# Altium footprint library SBC_PcbLib.PcbLib: 52 footprints (part 3 of 4)
Each footprint in its own frame and in the unit in brackets; x right, y up, seen from the top. Pads: shape width x height; smd on the part's side, far side on the other; paste and mask are expansions set on the pad; w line width, h text height; cw(c..) or ccw(c..) is an arc to the next point about the centre after c.
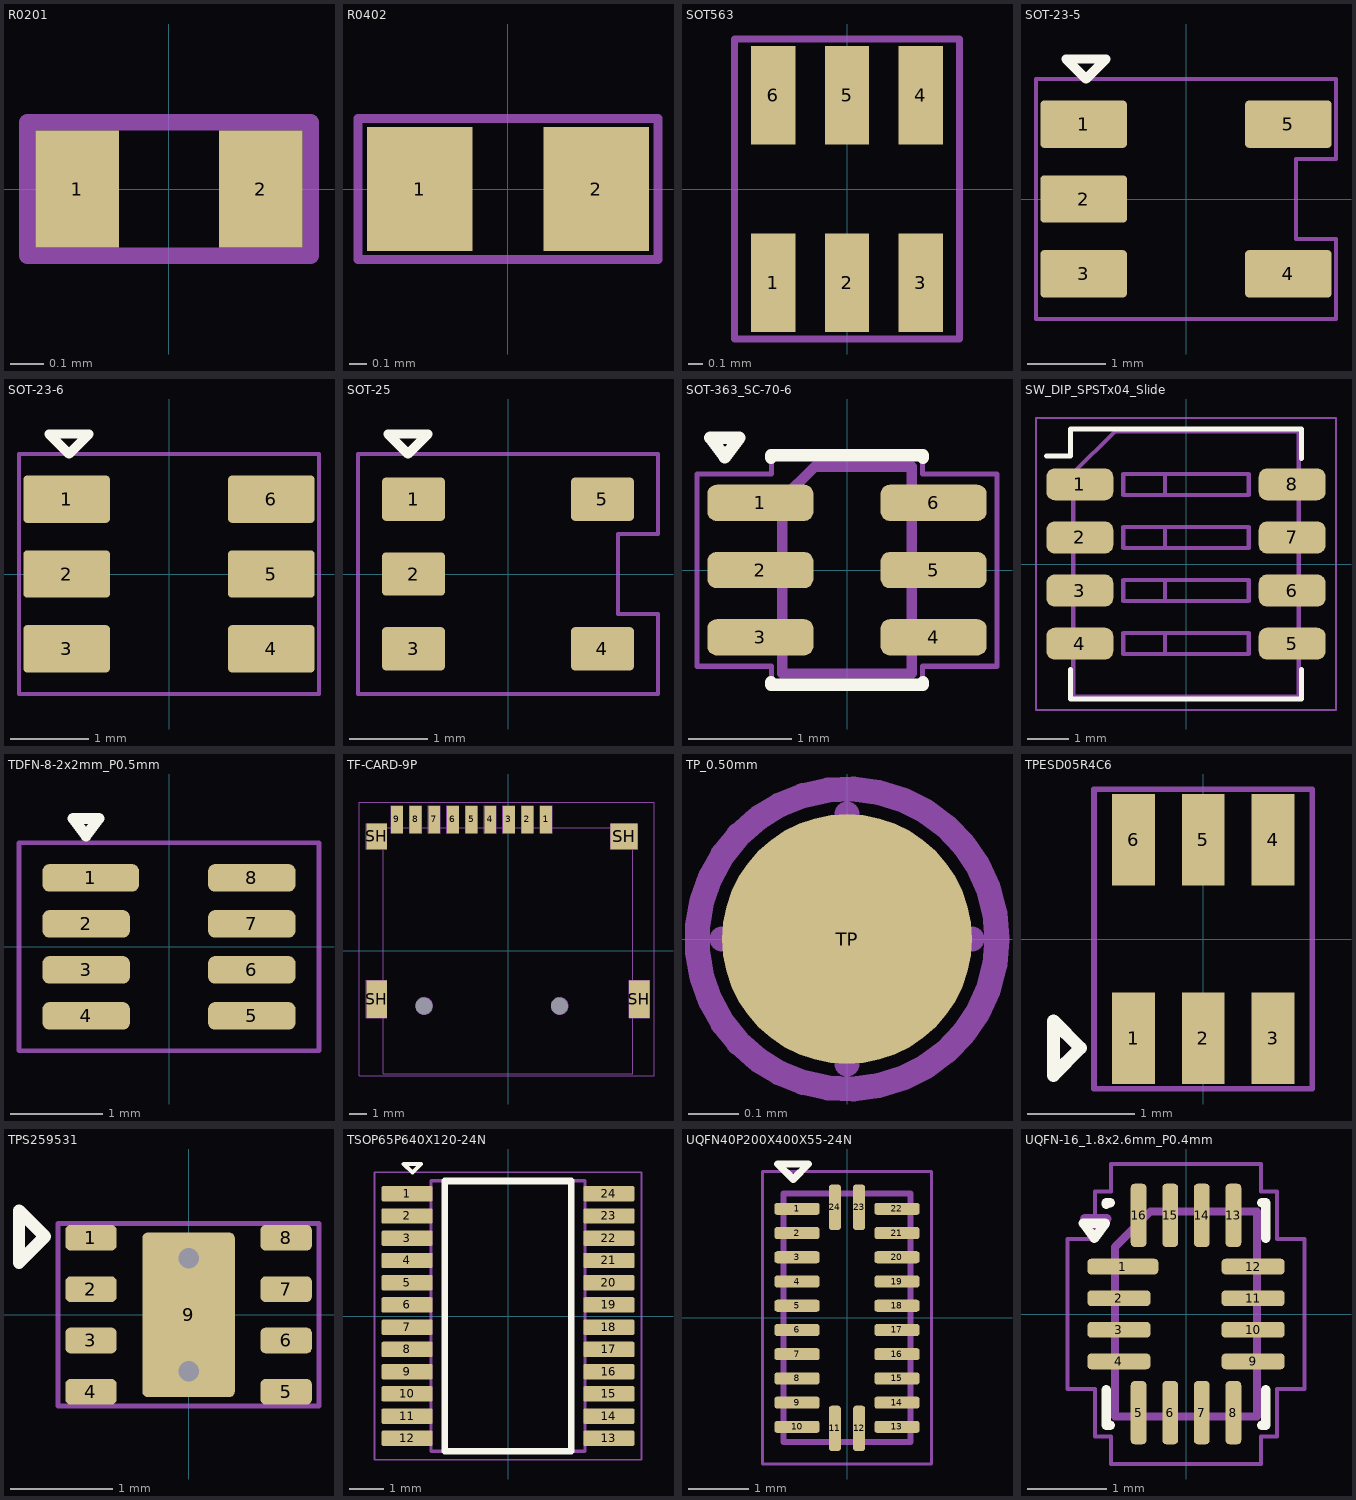
[diagram p2: the footprints below, top view; thin cyan lines are the x and y axes]

## R0201 [mm]
pads (2):
  rect 0.25x0.35 smd: 1(-0.275,0) 2(0.275,0)
Top Courtyard:
  lines w0.05: -0.425,-0.2 -0.425,0 -0.425,0.2 0.425,0.2 0.425,-0.2 -0.425,-0.2
Top Assembly:
  text ".Designator" at -1.016,-0.635 h0.5
3D body "R_0201_0603Metric.step": height 0.23, standoff 0, extent -0.3,-0.15 0.3,0.15

## R0402 [mm]
pads (2):
  rect 0.6x0.7 smd: 1(-0.5,0) 2(0.5,0)
Top Courtyard:
  lines w0.05: -0.85,-0.4 0.85,-0.4 0.85,0.4 -0.85,0.4 -0.85,0 -0.85,-0.4
Top Assembly:
  text ".Designator" at -1.016,-0.127 h0.5
3D body "R_0402_1005Metric.step": height 0.35, standoff 0, extent -0.5,-0.25 0.5,0.25

## SOT563 [mm]
pads (6):
  rect 0.3x0.67 smd: 1(-0.5,-0.635) 2(0,-0.635) 3(0.5,-0.635) 4(0.5,0.635) 5(0,0.635) 6(-0.5,0.635)
Top Courtyard:
  lines w0.05: -0.762,-1.016 -0.762,1.016 0.762,1.016 0.762,-1.016 -0.762,-1.016
3D body "AP61300Z6-7.stp": height 0.6, standoff 0, extent -0.8,-0.813 0.8,0.813

## SOT-23-5 [mm] "TI SOT-23-5"
pads (5):
  rrect16% 1.1x0.6 smd: 1(-1.3,0.95) 2(-1.3,0) 3(-1.3,-0.95) 4(1.3,-0.95) 5(1.3,0.95)
Top Overlay:
  lines w0.12: -1.524,1.778 -1.27,1.524 -1.016,1.778 -1.524,1.778
Top Courtyard:
  lines w0.05: -1.905,-1.524 -1.905,1.524 1.905,1.524 1.905,0.508 1.397,0.508 1.397,-0.508 1.905,-0.508 1.905,-1.524 -1.905,-1.524
Top Assembly:
  text ".Designator" at -2.413,-2.032 h0.5
3D body "TLV74311PDBVR.stp": height 1.2, standoff 0, extent -1.4,-1.45 1.4,1.45

## SOT-23-6 [mm] "TI SOT-23-6"
pads (6):
  rrect16% 1.1x0.6 smd: 1(-1.3,0.95) 2(-1.3,0) 3(-1.3,-0.95) 4(1.3,-0.95) 5(1.3,0) 6(1.3,0.95)
Top Overlay:
  lines w0.12: -1.524,1.778 -1.016,1.778 -1.27,1.524 -1.524,1.778
Top Courtyard:
  lines w0.05: -1.905,-1.524 1.905,-1.524 1.905,1.524 -1.905,1.524 -1.905,-1.524
Top Assembly:
  text ".Designator" at -2.286,-2.032 h0.5
3D body "TPS22918DBVR.step": height 1.45, standoff 0, extent -1.4,-1.45 1.4,1.45

## SOT-25 [mm] "SOT-25"
pads (5):
  rrect18% 0.8x0.55 smd: 1(-1.2,0.95) 2(-1.2,0) 3(-1.2,-0.95) 4(1.2,-0.95) 5(1.2,0.95)
Top Overlay:
  lines w0.12: -1.524,1.778 -1.016,1.778 -1.27,1.524 -1.524,1.778
Top Courtyard:
  lines w0.05: -1.905,-1.524 1.905,-1.524 1.905,-0.508 1.397,-0.508 1.397,0.508 1.905,0.508 1.905,1.524 -1.905,1.524 -1.905,-1.524
Top Assembly:
  text ".Designator" at -2.413,-2.032 h0.5
3D body "TLV74311PDBVR.stp": height 1.2, standoff 0, extent -1.4,-1.45 1.4,1.45

## SOT-363_SC-70-6 [mm] "SOT, 6 Pin (https://home.jeita.or.jp/tsc/std-pdf/ED-7500A.pdf#page=170, JEDEC MO-203, variant AB, https://www.jedec.org/document_search?search_api_views_fulltext=MO-203)"
pads (6):
  rrect50% 1.025x0.35 smd: 1(-0.837,0.65) 2(-0.837,0) 3(-0.837,-0.65) 4(0.837,-0.65) 5(0.837,0) 6(0.837,0.65)
Top Overlay:
  lines w0.12: -0.735,-1.085 -0.735,-1.11 0.735,-1.11 0.735,-1.085 ; -0.735,1.085 -0.735,1.11 0.735,1.11 0.735,1.085 ; -1.32,1.28 -1.18,1.09 -1.04,1.28 -1.32,1.28
Top Courtyard:
  lines w0.05: -1.45,-0.93 -1.45,0.93 -0.73,0.93 -0.73,1.1 0.73,1.1 0.73,0.93 1.45,0.93 1.45,-0.93 0.73,-0.93 0.73,-1.1 -0.73,-1.1 -0.73,-0.93 -1.45,-0.93
Top Assembly:
  lines w0.1: -0.625,-1 0.625,-1 0.625,1 -0.312,1 -0.625,0.687 -0.625,-1
  text ".Designator" at -2.032,-1.778 h0.5
3D body "TPESD05R4C6_SOT-363.step": height 0.95, standoff 0, extent -1.05,-1 1.05,1

## SW_DIP_SPSTx04_Slide [mm] "SMD 4x-dip-switch SPST P1.27mm"
pads (8):
  rrect50% 1.6x0.76 smd: 1(-2.54,1.905) 2(-2.54,0.635) 3(-2.54,-0.635) 4(-2.54,-1.905) 5(2.54,-1.905) 6(2.54,-0.635) 7(2.54,0.635) 8(2.54,1.905)
Top Overlay:
  lines w0.12: -3.34,2.585 -2.76,2.585 -2.76,3.235 2.76,3.235 2.76,2.525 ; -2.76,-2.525 -2.76,-3.235 2.76,-3.235 2.76,-2.525
Top Courtyard:
  lines w0.05: -3.59,-3.49 3.59,-3.49 3.59,3.49 -3.59,3.49 -3.59,-3.49
Top Assembly:
  lines w0.1: -1.5,-2.155 -1.5,-1.655 ; -1.5,-2.155 -1.5,-1.655 ; -1.5,-2.155 1.5,-2.155 1.5,-1.655 -1.5,-1.655 ; -1.5,-2.155 -0.5,-2.155 ; -1.5,-1.655 -0.5,-1.655 ; -1.5,-0.885 -1.5,-0.385 ; -1.5,-0.885 -0.5,-0.885 ; -1.5,-0.885 1.5,-0.885 1.5,-0.385 -1.5,-0.385 ; -1.5,-0.885 -1.5,-0.385 ; -1.5,-0.385 -0.5,-0.385 ; -1.5,0.385 1.5,0.385 1.5,0.885 -1.5,0.885 ; -1.5,0.385 -0.5,0.385 ; -1.5,0.385 -1.5,0.885 ; -1.5,0.385 -1.5,0.885 ; -1.5,0.885 -0.5,0.885 ; -1.5,1.655 1.5,1.655 1.5,2.155 -1.5,2.155 ; -1.5,1.655 -0.5,1.655 ; -1.5,1.655 -1.5,2.155 ; -1.5,1.655 -1.5,2.155 ; -1.5,2.155 -0.5,2.155 ; -0.5,-2.155 -0.5,-1.655 ; -0.5,-2.155 -0.5,-1.655 ; -0.5,-0.885 -0.5,-0.385 ; -0.5,-0.885 -0.5,-0.385 ; -0.5,0.385 -0.5,0.885 ; -0.5,0.385 -0.5,0.885 ; -0.5,1.655 -0.5,2.155 ; -0.5,1.655 -0.5,2.155 ; -2.7,-3.175 -2.7,2.175 -1.7,3.175 2.7,3.175 2.7,-3.175 -2.7,-3.175
  text "on" at 0.19,2.265 h0.8
  text ".Designator" at -3.683,-4.064 h0.8
3D body "SW_DIP_SPSTx04_Slide_Copal_CHS-04A_W5.08mm_P1.27mm_JPin.step": height 2.65, standoff 0, extent -2.8,-3.155 2.8,3.155

## TDFN-8-2x2mm_P0.5mm [mm]
pads (8):
  rrect50% 1.05x0.3 smd: 1(-0.85,0.75)
  rrect50% 0.95x0.3 smd: 2(-0.9,0.25) 3(-0.9,-0.25) 4(-0.9,-0.75) 5(0.9,-0.75) 6(0.9,-0.25) 7(0.9,0.25) 8(0.9,0.75)
Top Overlay:
  lines w0.12: -1.042,1.397 -0.902,1.207 -0.762,1.397 -1.042,1.397
Top Paste:
  rectangle: 0.04,-0.54 0.36,-0.06
Top Courtyard:
  lines w0.05: -1.63,-1.13 -1.25,-1.13 1.25,-1.13 1.63,-1.13 1.63,1.13 1.25,1.13 -1.25,1.13 -1.63,1.13 -1.63,-1.13
Top Assembly:
  text ".Designator" at -2.159,-1.778 h0.5
3D body "SY75714TWL-TR_TDFN-8_2x2mm_P0.5mm.step": height 0.75, standoff 0, extent -1,-1 1,1

## TF-CARD-9P [mm]
pads (15):
  rect 0.7x1.6 smd: 1(2.25,7.75) 2(1.15,7.75) 3(0.05,7.75) 4(-1.05,7.75) 5(-2.15,7.75) 6(-3.25,7.75) 7(-4.35,7.75) 8(-5.45,7.75) 9(-6.55,7.75)
  round 0 hole 1 unplated: 5(-4.95,-3.25) 5(3.05,-3.25)
  rect 1.2x2.2 smd: SH(-7.75,-2.85) SH(7.75,-2.85)
  rect 1.2x1.5 smd: SH(-7.75,6.75)
  rect 1.6x1.5 smd: SH(6.85,6.75)
Mechanical 1:
  circle w0.013: c3.05,-3.25 r0.5
  circle w0.013: c-4.95,-3.25 r0.5
  lines w0.013: -7.375,-7.25 -7.375,7.25 7.375,7.25 7.375,-7.25 -7.375,-7.25
  text "GND" at 7.75,-2.85 h0.25
  text "GND" at 6.85,6.75 h0.25
  text "GND" at -7.75,-2.85 h0.25
  text "GND" at -7.75,6.75 h0.25
  text "1" at 2.25,6.6 h0.3
  text "2" at 1.15,6.6 h0.3
  text "3" at 0.05,6.6 h0.3
  text "4" at -1.05,6.6 h0.3
  text "5" at -2.15,6.6 h0.3
  text "6" at -3.25,6.6 h0.3
  text "7" at -4.35,6.6 h0.3
  text "8" at -5.45,6.6 h0.3
  text "CD" at -6.55,6.6 h0.3
Mechanical 2:
  lines w0.013: -8.35,-3.95 -8.35,-1.75 -7.15,-1.75 -7.15,-3.95 -8.35,-3.95 ; -8.35,6 -8.35,7.5 -7.15,7.5 -7.15,6 -8.35,6 ; -6.9,6.95 -6.9,8.55 -6.2,8.55 -6.2,6.95 -6.9,6.95 ; -5.8,6.95 -5.8,8.55 -5.1,8.55 -5.1,6.95 -5.8,6.95 ; -4.7,6.95 -4.7,8.55 -4,8.55 -4,6.95 -4.7,6.95 ; -3.6,6.95 -3.6,8.55 -2.9,8.55 -2.9,6.95 -3.6,6.95 ; -2.5,6.95 -2.5,8.55 -1.8,8.55 -1.8,6.95 -2.5,6.95 ; -1.4,6.95 -1.4,8.55 -0.7,8.55 -0.7,6.95 -1.4,6.95 ; -0.3,6.95 -0.3,8.55 0.4,8.55 0.4,6.95 -0.3,6.95 ; 0.8,6.95 0.8,8.55 1.5,8.55 1.5,6.95 0.8,6.95 ; 1.9,6.95 1.9,8.55 2.6,8.55 2.6,6.95 1.9,6.95 ; 6.05,6 6.05,7.5 7.65,7.5 7.65,6 6.05,6 ; 7.15,-3.95 7.15,-1.75 8.35,-1.75 8.35,-3.95 7.15,-3.95
Top Courtyard:
  lines w0.05: -8.763,-7.366 8.636,-7.366 8.636,8.763 -8.763,8.763 -8.763,-7.366
3D body "Same_Sky_MSD-1-A.step": height 1.86, standoff -0.54, extent -8.075,-7.176 8.075,7.874

## TP_0.50mm [mm] "Testpoint 0.50mm diameter"
height 0.1
pads (1):
  round 0.5 smd paste-1: TP(0,0)
Top Courtyard:
  circle w0.05: c0,0 r0.3
  lines w0.05: -0.25,0 0.25,0 ; 0,-0.25 0,0.25
Top Assembly:
  circle w0.05: c0,0 r0.3
  text ".Designator" at -0.254,-0.117 h0.25
3D body: height 0.1, standoff 0, extent -0.2,-0.2 0.2,0.2

## TPESD05R4C6 [mm]
pads (6):
  rect 0.4x0.85 smd: 1(-0.65,-0.925) 2(0,-0.925) 3(0.65,-0.925) 4(0.65,0.925) 5(0,0.925) 6(-0.65,0.925)
Top Overlay:
  lines w0.12: -1.397,-1.27 -1.397,-0.762 -1.143,-1.016 -1.397,-1.27
Top Courtyard:
  lines w0.05: -1.019,-1.396 1.013,-1.396 1.013,1.398 -1.019,1.398 -1.019,-1.396
Top Assembly:
  lines w0.05: -1.016,-1.397 -1.016,1.397 1.016,1.397 1.016,-1.397 -1.016,-1.397
3D body "SOT-363_SC-70-6.step": height 1.1, standoff 0, extent -1,-1.05 1,1.05

## TPS259531 [mm]
pads (9):
  rrect40% 0.5x0.25 smd: 1(-0.95,0.75) 2(-0.95,0.25) 3(-0.95,-0.25) 4(-0.95,-0.75) 5(0.95,-0.75) 6(0.95,-0.25) 7(0.95,0.25) 8(0.95,0.75)
  rrect11% 0.9x1.6 smd: 9(0,0)
via 0,0.55 diameter 0.45 hole 0.2
via 0,-0.55 diameter 0.45 hole 0.2
Top Overlay:
  lines w0.12: -1.651,0.508 -1.397,0.762 -1.651,1.016 -1.651,0.508
Top Courtyard:
  lines w0.05: -1.27,-0.889 1.27,-0.889 1.27,0.889 -1.27,0.889 -1.27,-0.889
Top Assembly:
  lines w0.05: -1.27,-0.889 -1.27,0.889 1.27,0.889 1.27,-0.889 -1.27,-0.889
3D body "TPS259531DSGR.stp": height 0.77, standoff 0, extent -1,-1 1,1

## TSOP65P640X120-24N [mm] "TSOP, 24-Leads, Body 7.80x4.40mm, Pitch 0.65mm, IPC Medium Density"
height 1.2
pads (24):
  rrect22% 1.5x0.45 smd: 1(-2.95,3.575) 2(-2.95,2.925) 3(-2.95,2.275) 4(-2.95,1.625) 5(-2.95,0.975) 6(-2.95,0.325) 7(-2.95,-0.325) 8(-2.95,-0.975) 9(-2.95,-1.625) 10(-2.95,-2.275) 11(-2.95,-2.925) 12(-2.95,-3.575) 13(2.95,-3.575) 14(2.95,-2.925) 15(2.95,-2.275) 16(2.95,-1.625) 17(2.95,-0.975) 18(2.95,-0.325) 19(2.95,0.325) 20(2.95,0.975) 21(2.95,1.625) 22(2.95,2.275) 23(2.95,2.925) 24(2.95,3.575)
Top Overlay:
  lines w0.12: -3.048,4.445 -2.54,4.445 -2.794,4.191 -3.048,4.445
  lines w0.2: -1.85,-3.95 1.85,-3.95 1.85,3.95 -1.85,3.95 -1.85,-3.95
Top Courtyard:
  lines w0.05: -3.9,-4.2 3.9,-4.2 3.9,4.2 -3.9,4.2 -3.9,-4.2
Top Assembly:
  lines w0.1: -2.25,-3.95 2.25,-3.95 2.25,3.95 -2.25,3.95 -2.25,-3.95
3D body "TPD12S016PWR.stp": height 1.13, standoff 0, extent -3.2,-3.9 3.2,3.9

## UQFN40P200X400X55-24N [mm] "QFN, 24-Leads, Body 2.00x4.00mm, Pitch 0.40mm, IPC Medium Density"
height 0.55
pads (24):
  rrect50% 0.75x0.2 smd: 1(-0.825,1.8) 2(-0.825,1.4) 3(-0.825,1) 4(-0.825,0.6) 5(-0.825,0.2) 6(-0.825,-0.2) 7(-0.825,-0.6) 8(-0.825,-1) 9(-0.825,-1.4) 10(-0.825,-1.8) 13(0.825,-1.8) 14(0.825,-1.4) 15(0.825,-1) 16(0.825,-0.6) 17(0.825,-0.2) 18(0.825,0.2) 19(0.825,0.6) 20(0.825,1) 21(0.825,1.4) 22(0.825,1.8)
  rrect50% 0.2x0.75 smd: 11(-0.2,-1.825) 12(0.2,-1.825) 23(0.2,1.825) 24(-0.2,1.825)
Top Overlay:
  lines w0.12: -1.143,2.54 -0.635,2.54 -0.889,2.286 -1.143,2.54
Top Courtyard:
  lines w0.05: -1.397,-2.413 -1.397,2.413 1.397,2.413 1.397,-2.413 -1.397,-2.413
Top Assembly:
  lines w0.1: -1.05,-2.05 -1.05,2.05 1.05,2.05 1.05,-2.05 -1.05,-2.05
3D body "TPD12S016RKTR.stp": height 0.55, standoff 0, extent -1,-2 1,2

## UQFN-16_1.8x2.6mm_P0.4mm [mm] "UQFN, 16 Pin (https://www.ti.com/lit/ml/qfnd836/qfnd836.pdf)"
pads (16):
  rrect50% 0.9x0.2 smd: 1(-0.8,0.6)
  rrect50% 0.8x0.2 smd: 2(-0.85,0.2) 3(-0.85,-0.2) 4(-0.85,-0.6) 9(0.85,-0.6) 10(0.85,-0.2) 11(0.85,0.2) 12(0.85,0.6)
  rrect50% 0.2x0.8 smd: 5(-0.6,-1.25) 6(-0.2,-1.25) 7(0.2,-1.25) 8(0.6,-1.25) 13(0.6,1.25) 14(0.2,1.25) 15(-0.2,1.25) 16(-0.6,1.25)
Top Overlay:
  lines w0.12: -1.01,-0.96 -1.01,-1.41 -0.96,-1.41 ; -1.01,1.39 -1.01,1.41 -0.96,1.41 ; 0.96,-1.41 1.01,-1.41 1.01,-0.96 ; 0.96,1.41 1.01,1.41 1.01,0.96 ; -1.3,1.15 -1.16,0.96 -1.02,1.15 -1.3,1.15
Top Courtyard:
  lines w0.05: -1.5,-0.95 -1.5,0.95 -1.15,0.95 -1.15,1.55 -0.95,1.55 -0.95,1.9 0.95,1.9 0.95,1.55 1.15,1.55 1.15,0.95 1.5,0.95 1.5,-0.95 1.15,-0.95 1.15,-1.55 0.95,-1.55 0.95,-1.9 -0.95,-1.9 -0.95,-1.55 -1.15,-1.55 -1.15,-0.95 -1.5,-0.95
Top Assembly:
  lines w0.1: -0.9,-1.3 0.9,-1.3 0.9,1.3 -0.45,1.3 -0.9,0.85 -0.9,-1.3
  lines w0.12: -1.283,1.206 -1.003,1.206 -1.143,1.016 -1.283,1.206
  text ".Designator" at -2.413,-2.413 h0.65
3D body "SN74AXC4T774RSVR.step": height 0.55, standoff 0, extent -0.9,-1.3 0.9,1.3